# EAGLE library part CON_JST_ZH_10 (library dp_devices.v6)
JST ZH series 1.5mm pitch 10 pins http://www.jst-mfg.com/product/pdf/eng/eZH.pdf 30mm from board edge to part's center
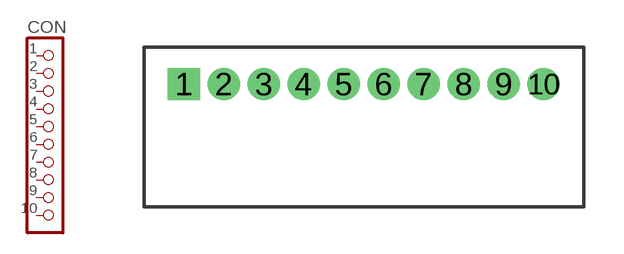
[diagram p180: symbol with the pads of CON_JST_ZH_PTH_10; footprint CON_JST_ZH_PTH_10]

Designator prefix CON

## CON_JST_ZH_10  [CON_JST_ZH_PTH_10]
1  1  pas
2  2  pas
3  3  pas
4  4  pas
5  5  pas
6  6  pas
7  7  pas
8  8  pas
9  9  pas
10  10  pas

## Footprint CON_JST_ZH_PTH_10 (pad centres in mm)
drill 0.7 square: 1 -6.75,1.6
drill 0.7: 2 -5.25,1.6; 3 -3.75,1.6; 4 -2.25,1.6; 5 -0.75,1.6; 6 0.75,1.6; 7 2.25,1.6; 8 3.75,1.6; 9 5.25,1.6; 10 6.75,1.6